# Altium footprint library ALANS100X12F30DT.PcbLib: 1 footprints
Each footprint in its own frame and in the unit in brackets; x right, y up, seen from the top. Pads: shape width x height; smd on the part's side, far side on the other; paste and mask are expansions set on the pad; w line width, h text height; cw(c..) or ccw(c..) is an arc to the next point about the centre after c.
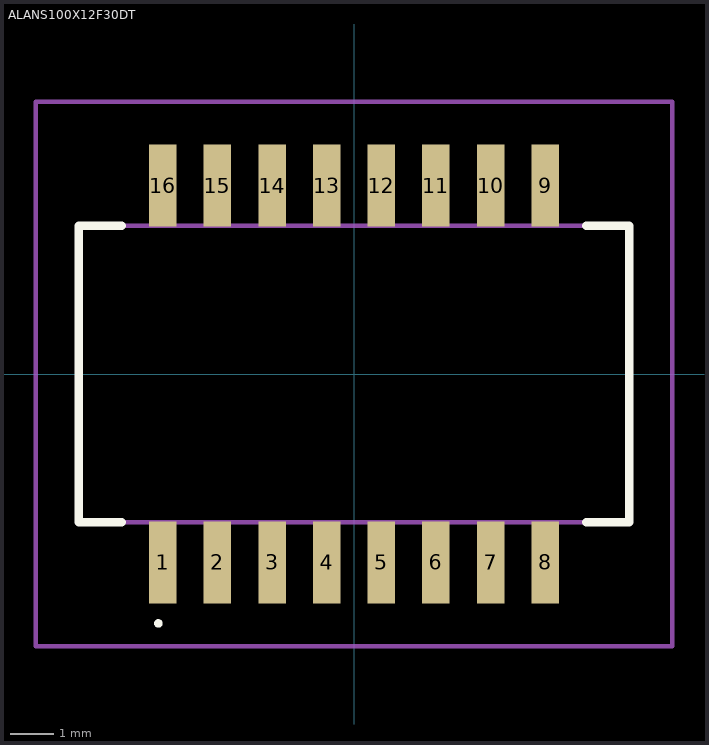
[diagram p0: the footprint, top view; thin cyan lines are the x and y axes]

## ALANS100X12F30DT [mm]
pads (16):
  rect 0.64x1.91 smd: 1(-4.445,-4.38) 2(-3.175,-4.38) 3(-1.905,-4.38) 4(-0.635,-4.38) 5(0.635,-4.38) 6(1.905,-4.38) 7(3.175,-4.38) 8(4.445,-4.38) 9(4.445,4.38) 10(3.175,4.38) 11(1.905,4.38) 12(0.635,4.38) 13(-0.635,4.38) 14(-1.905,4.38) 15(-3.175,4.38) 16(-4.445,4.38)
Top Overlay:
  lines w0.1: -4.6,-5.8 -4.6,-5.8 ; -4.6,-5.8 ccw(c-4.55,-5.8) -4.5,-5.8 ; -4.6,-5.8 cw(c-4.55,-5.8) -4.5,-5.8 ; -4.5,-5.8 -4.5,-5.8
  lines w0.2: -5.4,-3.45 -6.4,-3.45 -6.4,3.45 -5.4,3.45 ; 5.4,-3.45 6.4,-3.45 6.4,3.45 5.4,3.45
Mechanical 15:
  lines w0.1: -6.4,-3.45 6.4,-3.45 6.4,3.45 -6.4,3.45 -6.4,-3.45
Mechanical 20:
  lines w0.1: -7.4,-6.335 7.4,-6.335 7.4,6.335 -7.4,6.335 -7.4,-6.335